# Altium integrated library Atmega328P_Integrated_Library.IntLib: 1 symbol
Pins are listed as number, name and electrical type; pins without a type are passive.

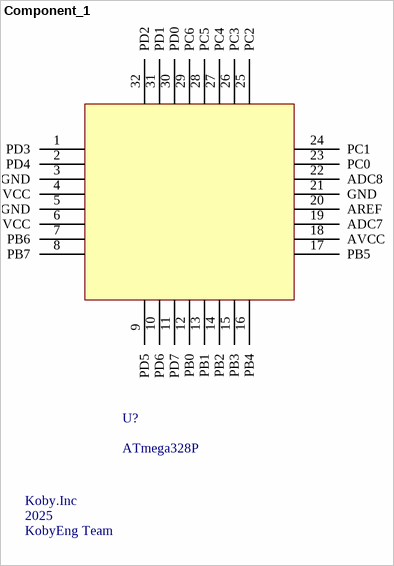
[diagram p0: symbol Component_1]

## Component_1
designator U?, comment ATmega328P  Company: KobyEng Team  Created By: Koby.Inc  Date Created: 2025
The Atmel® ATmega328P is a low-power CMOS 8-bit microcontroller based on the AVR® enhanced RISC architecture. By / executing powerful instructions in a single clock cycle, the ATmega328P achieves throughputs approaching 1MIPS per MHz / allowing the system designer to optimize power consumption versus processing speed.; ComponentLink1Description: Datasheet; ComponentLink1URL: https://ww1.microchip.com/downloads/aemDocuments/documents/MCU08/ProductDocuments/DataSheets/Atmel-7810-Automotive-Microcontrollers-ATmega328P_Datasheet.pdf
footprint TQFP80P900X900X120-32N (TQFP, 32-Leads, Body 7.00x7.00mm, Pitch 0.80mm, IPC Medium Density)
pins: 1 PD3, 2  PD4, 3 GND, 4 VCC, 5 GND, 6 VCC, 7  PB6, 8  PB7, 9 PD5, 10 PD6, 11 PD7, 12 PB0, 13 PB1, 14 PB2, 15 PB3, 16 PB4, 17 PB5 , 18 AVCC, 19 ADC7, 20 AREF, 21 GND, 22 ADC8, 23 PC0, 24 PC1, 25 PC2 , 26 PC3, 27 PC4, 28 PC5 , 29 PC6 , 30 PD0 , 31 PD1, 32 PD2 